# EAGLE library part LIS331DL (library HansAva)
MEMS motion sensor
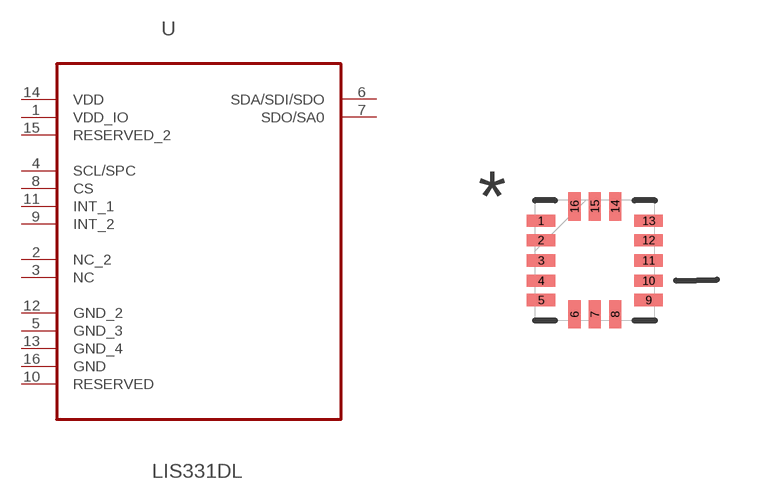
[diagram p32: symbol with the pads of LGA16R50P3X5_300X300X100; footprint LGA16R50P3X5_300X300X100]

Designator prefix U

## LIS331DL (MPN: LIS331DL; OC_FARNELL: 1838521; OC_NEWARK: 56P7989; PACKAGE: LGA-16; SUPPLIER: STMicroelectronics)  [LGA16R50P3X5_300X300X100]
1  VDD_IO  pwr
2  NC_2  nc
3  NC  nc
4  SCL/SPC  in
5  GND_3  pas
6  SDA/SDI/SDO
7  SDO/SA0  out
8  CS  in
9  INT_2  in
10  RESERVED  pas
11  INT_1  in
12  GND_2  pas
13  GND_4  pas
14  VDD  pwr
15  RESERVED_2  pwr
16  GND  pas

## Footprint LGA16R50P3X5_300X300X100 (pad centres in mm)
smd 0.711 x 0.305: 1 -1.346,0.991; 2 -1.346,0.508; 3 -1.346,0; 4 -1.346,-0.508; 5 -1.346,-0.991; 9 1.346,-0.991; 10 1.346,-0.508; 11 1.346,0; 12 1.346,0.508; 13 1.346,0.991
smd 0.305 x 0.711: 6 -0.508,-1.346; 7 0,-1.346; 8 0.508,-1.346; 14 0.508,1.346; 15 0,1.346; 16 -0.508,1.346